# Altium schematic symbol library avr32da32_evalboard_SchLib.SchLib: 4 symbols
Pins are listed as number, name and electrical type; pins without a type are passive.

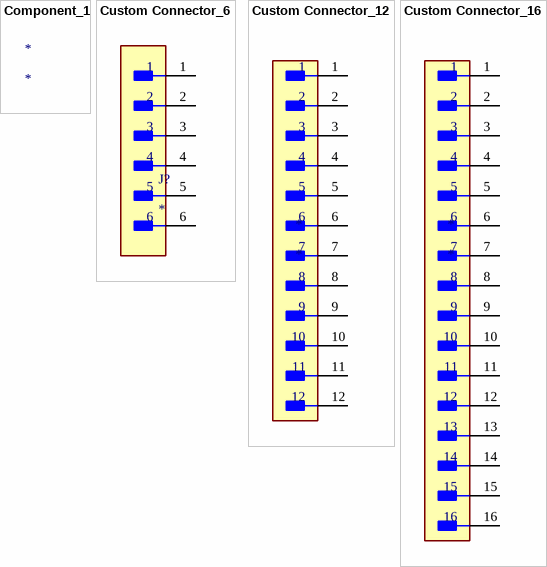
[diagram p0: symbols Component_1 to Custom Connector_16]

## Component_1
designator *

## Custom Connector_6
designator J?
Board Connector, 6 Contact(s), 1 Row(s), Male, Straight, 0.1 inch Pitch, Solder Terminal, Black Insulator, Receptacle
footprint Custom Connector_6 (Board Connector, 6 Contact(s), 1 Row(s), Male, Straight, 0.1 inch Pitch, Solder Terminal, Black Insulator, Receptacle)
pins: 1, 2, 3, 4, 5, 6

## Custom Connector_12
designator *
footprint CUSTOM CONNECTOR_12
pins: 1, 2, 3, 4, 5, 6, 7, 8, 9, 10, 11, 12

## Custom Connector_16
designator *
footprint Custom Connector_16
pins: 1, 2, 3, 4, 5, 6, 7, 8, 9, 10, 11, 12, 13, 14, 15, 16